# Altium integrated library GJM1555C1HR30WB01D.IntLib: 1 symbol
Pins are listed as number, name and electrical type; pins without a type are passive.

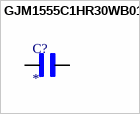
[diagram p0: symbol GJM1555C1HR30WB01D]

## GJM1555C1HR30WB01D
designator C?
0402 0.3 pF 50V Â±0.05 pF Tolerance C0G SMT Multilayer Ceramic Capacitor; MF: Murata; MP: GJM1555C1HR30WB01D; SnapEDA_Link: https://www.snapeda.com/parts/GJM1555C1HR30WB01D/Murata/view-part/?ref=snap; Package: 1005 Taiyo Yuden; Value: *; Check_prices: https://www.snapeda.com/parts/GJM1555C1HR30WB01D/Murata/view-part/?ref=eda
footprint CAPC1005X55N
pins: 1, 2